# Altium schematic symbol library Components - 31.10.26 - 17.45.SchLib: 1 symbol
Pins are listed as number, name and electrical type; pins without a type are passive.

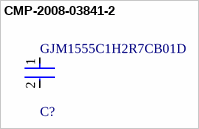
[diagram p0: symbol CMP-2008-03841-2]

## CMP-2008-03841-2
designator C?, comment GJM1555C1H2R7CB01D
Multi-Layer Ceramic Capacitor 2.7pF C0G  ±0.25pF 0402 Paper T/R; Voltage: 50V; Insulation Resistance: 10GR; Lead Free: Lead Free; Case Code (Metric): 1005; Min Operating Temperature: -55°C; Case Code (Imperial): 0402; Max Operating Temperature: 125°C; Thickness: 0.022inch; Voltage Rating (DC): 50V; Package Quantity: 1; Termination: SMD/SMT; Dielectric: C0G; Case/Package: 0402; Length: 1mm; Mount: Surface Mount; Height: 0.5mm; Voltage Rating: 50V; Radiation Hardening: No; Width: 0.02inch; Depth: 0.5mm; Packaging: Tape and Reel; Capacitance: 2.7pF
footprint FP-GJM155-0_05-IPC_C
footprint FP-GJM155-0_05-IPC_A
footprint FP-GJM155-0_05-IPC_B
footprint FP-GJM155-0_05-MFG
pins: 1, 2